# Altium footprint library 5015 Keystone.PcbLib: 1 footprints
Each footprint in its own frame and in the unit in brackets; x right, y up, seen from the top. Pads: shape width x height; smd on the part's side, far side on the other; paste and mask are expansions set on the pad; w line width, h text height; cw(c..) or ccw(c..) is an arc to the next point about the centre after c.
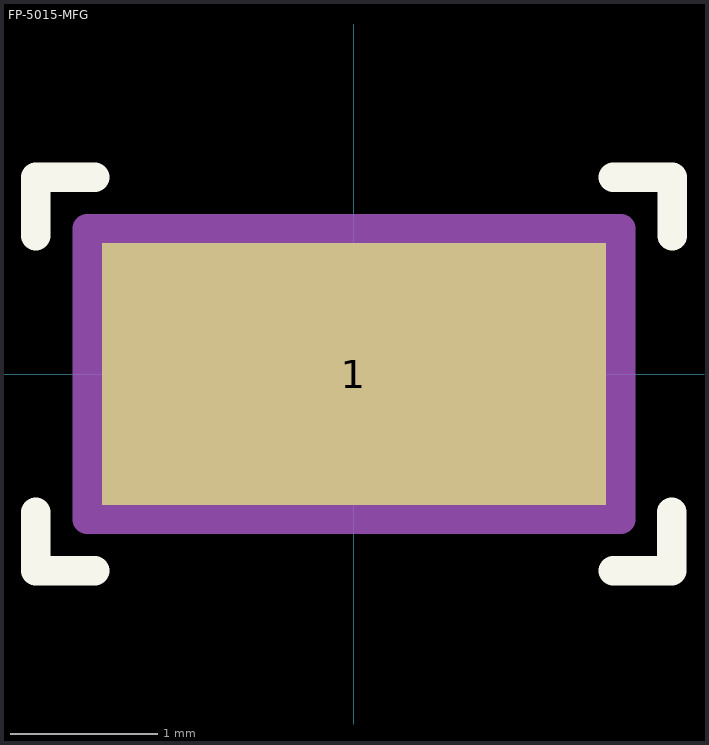
[diagram p0: the footprint, top view; thin cyan lines are the x and y axes]

## FP-5015-MFG [mm]
pads (1):
  rect 3.43x1.78 smd paste+0 mask+0: 1(0,0)
Top Overlay:
  lines w0.2: -2.165,-0.94 -2.165,-1.34 -1.765,-1.34 ; -2.165,0.94 -2.165,1.34 -1.765,1.34 ; 1.764,-1.339 2.164,-1.339 2.164,-0.939 ; 1.766,1.339 2.166,1.339 2.166,0.939
Top Assembly:
  lines w0.2: -1.815,-0.99 -1.815,0.99 1.815,0.99 1.815,-0.99 -1.815,-0.99
  text ".Designator" at 0,0 h1
Top 3D Body:
  lines w0.2: -1.359,-0.572 -1.359,0.572 1.359,0.572 1.359,-0.572 -1.359,-0.572
Top Courtyard:
  lines w0.2: -1.815,-0.99 -1.815,0.99 1.815,0.99 1.815,-0.99 -1.815,-0.99
Top Component Center:
  lines w0.1: -0.5,0 0.5,0 ; 0,-0.5 0,0.5